# Altium schematic symbol library TDN_5-901.SchLib: 2 symbols
Pins are listed as number, name and electrical type; pins without a type are passive.

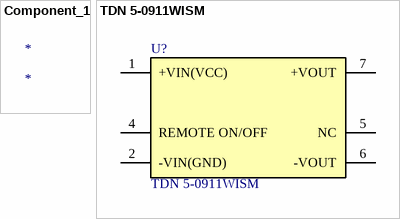
[diagram p0: symbols Component_1 to TDN 5-0911WISM]

## Component_1
designator *

## TDN 5-0911WISM
designator U?
TDN 5-0911WISM DC-DC Converter, 5V, 1A; No. of Outputs: 1 Output; Output Power Max: 5W; Voltage - 1: 5V; Current 1: 1A;; NexarPartId: 76519263; Number of Outputs: 1; RoHS: Compliant; Output Power: 5W; Width: 9.1mm; Height: 10.2mm
footprint TDN 5WISM SINGLE_TRP
pins: 1 +VIN(VCC) (power), 2 -VIN(GND) (power), 4 REMOTE ON/OFF, 5 NC, 6 -VOUT (power), 7 +VOUT (power)